# Altium footprint library CONV_IRM-10-12.PcbLib: 1 footprints
Each footprint in its own frame and in the unit in brackets; x right, y up, seen from the top. Pads: shape width x height; smd on the part's side, far side on the other; paste and mask are expansions set on the pad; w line width, h text height; cw(c..) or ccw(c..) is an arc to the next point about the centre after c.
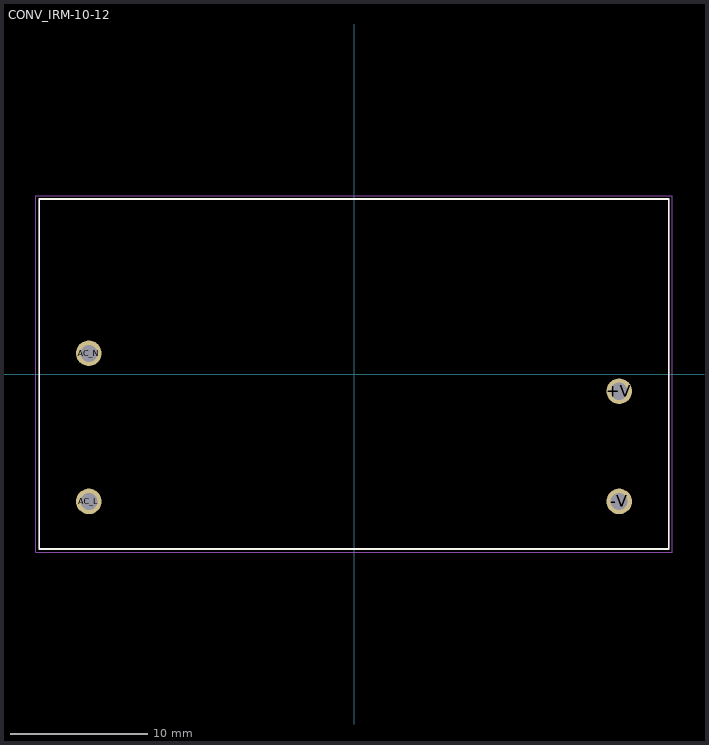
[diagram p0: the footprint, top view; thin cyan lines are the x and y axes]

## CONV_IRM-10-12 [mm]
height 21.5
pads (4):
  round 1.86 hole 1.24: +V(19.25,-1.25) -V(19.25,-9.25) AC_L(-19.25,-9.25) AC_N(-19.25,1.5)
Top Overlay:
  lines w0.127: -22.85,-12.7 22.85,-12.7 22.85,12.7 -22.85,12.7 -22.85,-12.7
  text ".DESIGNATOR" at -23.095,13.043 h1
Assembly Top:
  lines w0.127: -22.85,-12.7 22.85,-12.7 22.85,12.7 -22.85,12.7 -22.85,-12.7
Courtyard Top:
  lines w0.05: -23.1,-12.95 23.1,-12.95 23.1,12.95 -23.1,12.95 -23.1,-12.95
3D body "power_supply_irm-10-12.stp": height 21.5, standoff -3.5, extent -22.85,-12.7 22.85,12.7